# Altium schematic symbol library SBT-0180W.SchLib: 1 symbol
Pins are listed as number, name and electrical type; pins without a type are passive.

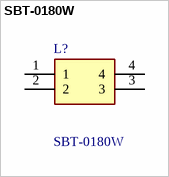
[diagram p0: symbol SBT-0180W]

## SBT-0180W
designator L?
MULTICOMP - SBT-0180W - CHOKE, COMMON MODE, 2X80UH; Manufacturer_Name: Multicomp Pro; Geometry.Height: 8mm; Farnell Part Number: *; Farnell Price/Stock: *; Manufacturer_Part_Number: SBT-0180W; Datasheet Link: https://www.digikey.com/en/products/detail/kemet/SBT-0180W/9744594
footprint DIPS508W60P254L640H800Q4N
pins: 1, 2, 3, 4